# Altium footprint library MISKO.PcbLib: 37 footprints (part 1 of 3)
Each footprint in its own frame and in the unit in brackets; x right, y up, seen from the top. Pads: shape width x height; smd on the part's side, far side on the other; paste and mask are expansions set on the pad; w line width, h text height; cw(c..) or ccw(c..) is an arc to the next point about the centre after c.
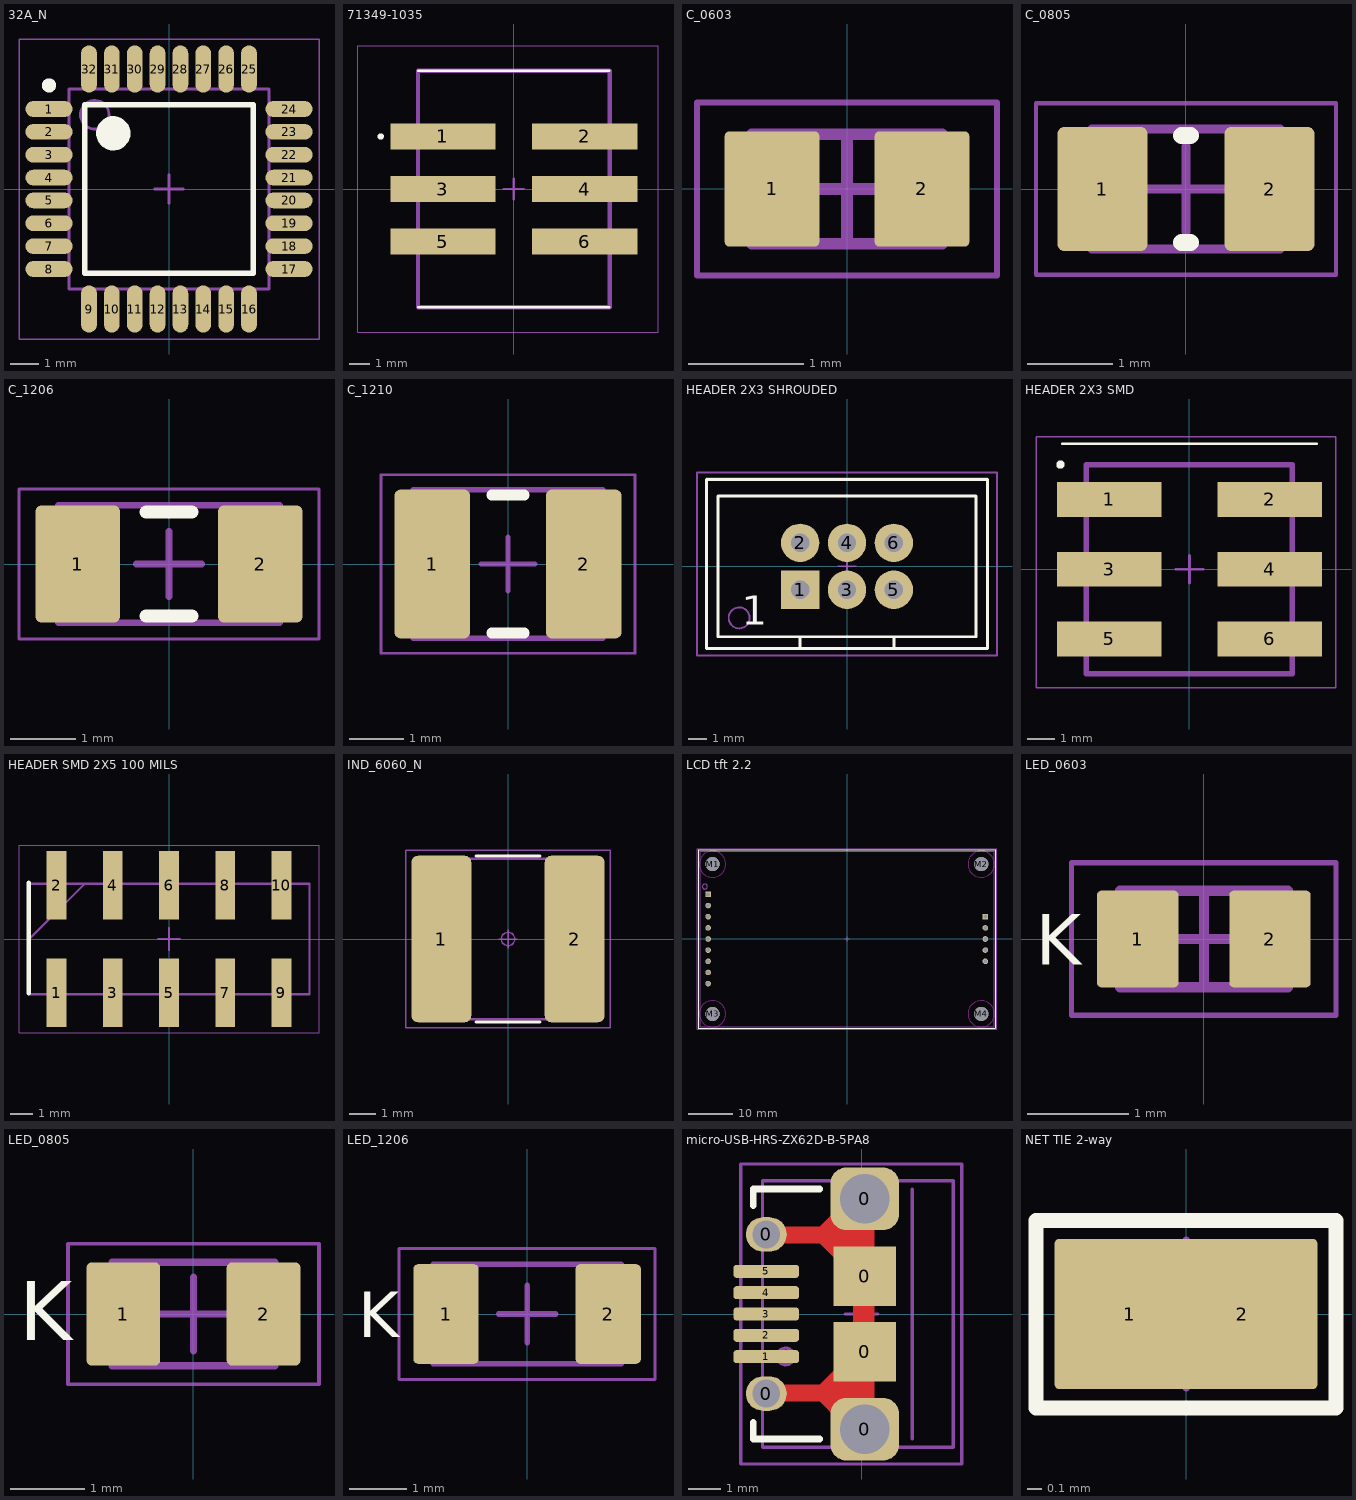
[diagram p0: the footprints below, top view; thin cyan lines are the x and y axes]

## 32A_N [mm]
pads (32):
  oval 1.65x0.55 smd: 1(-4.2,2.8) 2(-4.2,2) 3(-4.2,1.2) 4(-4.2,0.4) 5(-4.2,-0.4) 6(-4.2,-1.2) 7(-4.2,-2) 8(-4.2,-2.8) 17(4.2,-2.8) 18(4.2,-2) 19(4.2,-1.2) 20(4.2,-0.4) 21(4.2,0.4) 22(4.2,1.2) 23(4.2,2) 24(4.2,2.8)
  oval 0.55x1.65 smd: 9(-2.8,-4.2) 10(-2,-4.2) 11(-1.2,-4.2) 12(-0.4,-4.2) 13(0.4,-4.2) 14(1.2,-4.2) 15(2,-4.2) 16(2.8,-4.2) 25(2.8,4.2) 26(2,4.2) 27(1.2,4.2) 28(0.4,4.2) 29(-0.4,4.2) 30(-1.2,4.2) 31(-2,4.2) 32(-2.8,4.2)
Top Overlay:
  circle w0.6: c-1.95,1.95 r0.3
  circle w0.25: c-4.2,3.625 r0.125
  lines w0.2: -2.95,-2.95 2.95,-2.95 2.95,2.95 -2.95,2.95 -2.95,-2.95
Top Component Outline:
  circle w0.1: c-2.6,2.6 r0.5
  lines w0.1: -3.5,-3.5 3.5,-3.5 3.5,3.5 -3.5,3.5 -3.5,-3.5
Top Component courtyard:
  lines w0.05: -5.25,-5.25 5.25,-5.25 5.25,5.25 -5.25,5.25 -5.25,-5.25
  lines w0.1: -0.5,0 0.5,0 ; 0,-0.5 0,0.5
3D body: height 1.2, standoff 0, extent -3.5,-3.5 3.5,3.5

## 71349-1035 [mm] "Molex shrouded 2x3 pin header 100 mils"
pads (6):
  rect 5.08x1.27 smd: 1(-3.43,2.54) 2(3.43,2.54) 3(-3.43,0) 4(3.43,0) 5(-3.43,-2.54) 6(3.43,-2.54)
Top Overlay:
  circle w0.2: c-6.43,2.54 r0.05
  lines w0.1: -4.635,-5.715 4.635,-5.715 ; -4.635,5.715 4.635,5.715
Top Component Outline:
  lines w0.2: -4.635,-5.715 4.635,-5.715 4.635,5.715 -4.635,5.715 -4.635,-5.715
Top Component courtyard:
  lines w0.05: -7.53,-6.915 6.97,-6.915 6.97,6.915 -7.53,6.915 -7.53,-6.915
  lines w0.102: -0.5,0 0.5,0 -0.5,0 ; 0,-0.5 0,0.5 0,-0.5
3D body "71349-1035.stp": height 13.35, standoff 0.01, extent -5.334,-7.366 5.334,7.366

## C_0603 [mm] "Chip Capacitor, 2-Leads, Body 1.57x0.85mm, IPC Medium Density"
height 0.95
pads (2):
  rrect10% 0.82x1 smd: 1(-0.65,0) 2(0.65,0)
Top Component Outline:
  lines w0.1: -0.825,-0.475 0.825,-0.475 0.825,0.475 -0.825,0.475 -0.825,-0.475
Top Component courtyard:
  lines w0.05: -1.3,-0.75 1.3,-0.75 1.3,0.75 -1.3,0.75 -1.3,-0.75
  lines w0.1: -0.475,0 0.475,0 ; 0,-0.475 0,0.475
3D body "C0603N.step": height 0.95, standoff 0, extent -0.825,-0.475 0.825,0.475

## C_0805 [mm] "Chip Capacitor, 2-Leads, Body 2.05x1.25mm, IPC Medium Density"
height 1.4
pads (2):
  rrect15% 1.05x1.45 smd: 1(-0.975,0) 2(0.975,0)
Top Overlay:
  lines w0.2: -0.05,-0.625 0.05,-0.625 ; -0.05,0.625 0.05,0.625
Top Component Outline:
  lines w0.1: -1.1,-0.7 1.1,-0.7 1.1,0.7 -1.1,0.7 -1.1,-0.7
Top Component courtyard:
  lines w0.05: -1.75,-1 1.75,-1 1.75,1 -1.75,1 -1.75,-1
  lines w0.1: -0.5,0 0.5,0 ; 0,-0.5 0,0.5
3D body "C0805_N.step": height 1.4, standoff 0, extent -1.1,-0.7 1.1,0.7

## C_1206 [mm] "Chip Capacitor, 2-Leads, Body 3.20x1.60mm, IPC Medium Density"
height 1.8
pads (2):
  rrect15% 1.3x1.8 smd: 1(-1.4,0) 2(1.4,0)
Top Overlay:
  lines w0.2: -0.35,-0.8 0.35,-0.8 ; -0.35,0.8 0.35,0.8
Top Component Outline:
  lines w0.1: -1.7,-0.9 -1.7,0.9 1.7,0.9 1.7,-0.9 -1.7,-0.9
Top Component courtyard:
  lines w0.05: -2.3,-1.15 -2.3,1.15 2.3,1.15 2.3,-1.15 -2.3,-1.15
  lines w0.1: -0.5,0 0.5,0 ; 0,-0.5 0,0.5
3D body "C1206(3216)_N.step": height 1.8, standoff 0, extent -1.7,-0.9 1.7,0.9

## C_1210 [mm] "Chip Capacitor, 2-Leads, Body 3.20x2.50mm, IPC Medium Density"
height 2.8
pads (2):
  rrect15% 1.4x2.75 smd: 1(-1.4,0) 2(1.4,0)
Top Overlay:
  lines w0.2: -0.3,-1.275 0.3,-1.275 ; -0.3,1.275 0.3,1.275
Top Component Outline:
  lines w0.1: -1.75,-1.375 -1.75,1.375 1.75,1.375 1.75,-1.375 -1.75,-1.375
Top Component courtyard:
  lines w0.05: -2.35,-1.65 -2.35,1.65 2.35,1.65 2.35,-1.65 -2.35,-1.65
  lines w0.1: -0.5,0 0.5,0 ; 0,-0.5 0,0.5
3D body "C1210(3225)_N.step": height 2.8, standoff 0, extent -1.75,-1.375 1.75,1.375

## HEADER 2X3 SHROUDED [mil]
pads (6):
  rect 82x82 hole 39.37: 1(-100,-50)
  round 82 hole 39.37: 2(-100,50) 3(0,-50) 4(0,50) 5(100,-50) 6(100,50)
Top Overlay:
  lines w5.91: -100,-175 -100,-150 ; 100,-175 100,-150 ; -300,-175 -300,185 300,185 300,-175 -300,-175 ; -275,-150 -275,150 275,150 275,-150 -275,-150
  text "1" at -225,-125 h62.5
Top Component Outline:
  circle w4: c-230,-110 r22.36
  lines w4: -300,-175 -300,187.21 300,187.21 300,-175 -300,-175
Top Component courtyard:
  lines w4: -320,-190 320,-190 320,200 -320,200 -320,-190 ; -19.69,0.2 19.68,0.2 -19.69,0.2 ; 0,-19.49 0,19.88 0,-19.49
3D body "0918_SEK_low_profile_male_header_straight_6-pin_2_9_PCB.stp": height 372.05, standoff -125.98, extent -300,-175 300,187.21

## HEADER 2X3 SMD [mil] "SMD 2x3 pin header 100 mils"
pads (6):
  rect 150x50 smd: 1(-115,100) 2(115,100) 3(-115,0) 4(115,0) 5(-115,-100) 6(115,-100)
Top Overlay:
  circle w7.87: c-185,150 r1.97
  lines w3.94: -182.48,180 182.48,180
Top Component Outline:
  lines w7.87: -147.63,-150 -147.63,150 147.64,150 147.64,-150 -147.63,-150
Top Component courtyard:
  lines w1.97: -220,-170 -220,190 210,190 210,-170 -220,-170
  lines w4: -19.69,0 19.68,0 -19.68,0 ; 0,-19.69 0,19.68 0,-19.68
3D body "pin_header_a-sl254-dg-g06mp1.stp": height 384.03, standoff 0.5, extent -147.63,-150 147.64,150

## HEADER SMD 2X5 100 MILS [mm]
pads (10):
  rect 0.9x3.1 smd: 1(-5.08,-2.425) 2(-5.08,2.425) 3(-2.54,-2.425) 4(-2.54,2.425) 5(0,-2.425) 6(0,2.425) 7(2.54,-2.425) 8(2.54,2.425) 9(5.08,-2.425) 10(5.08,2.425)
Top Overlay:
  lines w0.2: -6.33,-2.45 -6.33,2.55
Top Component Outline:
  lines w0.1: -6.35,-0.04 -3.81,2.5 ; -6.35,-2.5 -6.35,2.5 6.35,2.5 6.35,-2.5 -6.35,-2.5
Top Component courtyard:
  lines w0.05: -6.775,-4.225 -6.775,4.225 6.775,4.225 6.775,-4.225 -6.775,-4.225
  lines w0.102: -0.5,0 0.5,0 -0.5,0 ; 0,-0.5 0,0.5 0,-0.5
3D body "M20-8760542P.stp": height 9.85, standoff -0.08, extent -6.33,-3.55 6.37,3.65

## IND_6060_N [mm] "Inductor, Chip; 6.00 mm L X 6.00 mm W X 2.80 mm H body"
height 2.8
pads (2):
  rrect22% 2.24x6.22 smd: 1(-2.49,0) 2(2.49,0)
Top Overlay:
  lines w0.12: -1.19,-3.1 1.19,-3.1 ; -1.19,3.1 1.19,3.1
Top Component Outline:
  lines w0.102: -3,-3 3,-3 ; -3,-3 -3,3 ; -3,-3 -3,3 ; -3,-3 -1.5,-3 -1.5,3 -3,3 ; -3,3 3,3 ; 3,-3 3,3 ; 3,-3 1.5,-3 1.5,3 3,3 ; 3,-3 3,3
Top Component courtyard:
  circle w0.05: c0,0 r0.25
  lines w0.05: -0.35,0 0.35,0 ; 0,-0.35 0,0.35 ; -3.81,-3.31 3.81,-3.31 3.81,3.31 -3.81,3.31 -3.81,-3.31
3D body "STEP-WE-LQS-6045-rev1.stp": height 4.51, standoff 0.01, extent -3,-3 3,3

## LCD tft 2.2 [mm]
pads (18):
  rect 1.27x1.27 hole 0.9: 1(-31.627,10.16) 10(31.5,5.08)
  round 1.27 hole 0.9: 2(-31.627,7.62) 3(-31.627,5.08) 4(-31.627,2.54) 5(-31.627,0) 6(-31.627,-2.54) 7(-31.627,-5.08) 8(-31.627,-7.62) 9(-31.627,-10.16) 11(31.5,2.54) 12(31.5,0) 13(31.5,-2.54) 14(31.5,-5.08)
  round 3.2 hole 3.2 unplated paste+0: M1(-30.627,17.05) M2(30.573,17.05) M3(-30.627,-17.05) M4(30.573,-17.05)
Top Overlay:
  lines w0.1: -33.907,-20.299 33.784,-20.299 33.784,20.341 -33.907,20.341 -33.907,-20.299
Top Solder:
  circle w3: c30.573,17.05 r1.5
  circle w3: c30.573,-17.05 r1.5
  circle w3: c-30.627,-17.05 r1.5
  circle w3: c-30.627,17.05 r1.5
Keep-Out Layer:
  circle w0.102: c30.573,17.05 r3
  circle w0.102: c30.573,-17.05 r3
  circle w0.102: c-30.627,-17.05 r3
  circle w0.102: c-30.627,17.05 r3
Top Component Outline:
  circle w0.102: c-32.357,11.938 r0.568
  lines w0.102: -33.5,-20 33.5,-20 33.5,20 -33.5,20 -33.5,-20
Top Component courtyard:
  lines w0.102: -34.163,-20.574 34.163,-20.574 34.163,20.574 -34.163,20.574 -34.163,-20.574 ; -0.5,0 0.5,0 -0.5,0 ; 0,-0.5 0,0.5 0,-0.5
3D body "User Library-TFT22.STEP": height 17.11, standoff -3.99, extent -33.5,-20 33.5,20

## LED_0603 [mm] "SMD LED, 2-Leads, Body 1.57x0.85mm, IPC Medium Density"
height 0.5
pads (2):
  rrect10% 0.8x0.95 smd: 1(-0.65,0) 2(0.65,0)
Top Overlay:
  text "K" at -1.651,-0.254 h0.5
Top Component Outline:
  lines w0.1: -0.825,-0.475 0.825,-0.475 0.825,0.475 -0.825,0.475 -0.825,-0.475
Top Component courtyard:
  lines w0.05: -1.3,-0.75 1.3,-0.75 1.3,0.75 -1.3,0.75 -1.3,-0.75
  lines w0.1: -0.475,0 0.475,0 ; 0,-0.475 0,0.475
3D body "STEP-WL-SMCW-0603-rev1.stp": height 0.7, standoff 0, extent -0.8,-0.4 0.8,0.4

## LED_0805 [mm] "SMD LED, 2-Leads, Body 2.05x1.25mm, IPC Medium Density"
height 0.8
pads (2):
  rrect15% 1x1.4 smd: 1(-0.95,0) 2(0.95,0)
Top Overlay:
  text "K" at -2.362,-0.356 h0.8
Top Component Outline:
  lines w0.1: -1.1,-0.7 -1.1,0.7 1.1,0.7 1.1,-0.7 -1.1,-0.7
Top Component courtyard:
  lines w0.05: -1.7,-0.95 -1.7,0.95 1.7,0.95 1.7,-0.95 -1.7,-0.95
  lines w0.1: -0.5,0 0.5,0 ; 0,-0.5 0,0.5
3D body "STEP-WL-SMCW-0805-rev1.stp": height 0.7, standoff 0, extent -1,-0.625 1,0.625

## LED_1206 [mm] "SMD LED, 2-Leads, Body 3.15x1.60mm, IPC Medium Density"
height 0.6
pads (2):
  rrect15% 1.15x1.75 smd: 1(-1.425,0) 2(1.425,0)
Top Overlay:
  text "K" at -2.972,-0.406 h0.8
Top Component Outline:
  lines w0.1: -1.65,-0.875 -1.65,0.875 1.65,0.875 1.65,-0.875 -1.65,-0.875
Top Component courtyard:
  lines w0.05: -2.25,-1.15 -2.25,1.15 2.25,1.15 2.25,-1.15 -2.25,-1.15
  lines w0.1: -0.5,0 0.5,0 ; 0,-0.5 0,0.5
3D body "STEP-WL-SMCW-1206-rev1.stp": height 0.68, standoff 0, extent -1.6,-0.8 1.6,0.8

## micro-USB-HRS-ZX62D-B-5PA8 [mm]
pads (11):
  rrect100% 1.25x1.05 hole 0.85: 0(-2.905,-2.425) 0(-2.905,2.425)
  rrect50% 2.1x1.9 hole 1.5: 0(0.095,-3.512) 0(0.095,3.512)
  rect 1.9x1.8 smd: 0(0.095,-1.15) 0(0.095,1.15)
  rrect50% 2x0.4 smd: 1(-2.905,-1.3) 2(-2.905,-0.65) 3(-2.905,0) 4(-2.905,0.65) 5(-2.905,1.3)
Top Layer:
  region: -2.921,-2.159 -1.27,-2.159 -0.254,-1.143 -0.254,1.143 -1.27,2.159 -2.921,2.159 -2.921,2.667 -1.27,2.667 -0.381,3.556 0.381,3.556 0.381,-3.556 -0.381,-3.556 -1.27,-2.667 -2.921,-2.667
Top Overlay:
  lines w0.2: -3.302,-3.302 -3.302,-3.81 -1.27,-3.81 ; -3.302,3.302 -3.302,3.81 -1.27,3.81
Top Solder:
  region: -3.937,1.397 -3.937,-1.397 -1.905,-1.397 -1.905,1.397
Top Component Outline:
  circle w0.102: c-2.318,-1.292 r0.254
  lines w0.1: 1.545,-3.81 1.545,3.81 ; -3.017,-4.064 -3.017,4.064 2.794,4.064 2.794,-4.064 -3.017,-4.064
Top Component courtyard:
  lines w0.102: -0.5,0 0.5,0 ; 0,-0.5 0,0.5 ; -3.683,-4.572 -3.683,4.572 3.048,4.572 3.048,-4.572 -3.683,-4.572
3D body "User Library-MicroUSB-B_Molex_105017-0001.step": height 2.68, standoff -0.62, extent -2.65,-4.1 2.78,4.1

## NET TIE 2-way [mil] "2-way net tie junction"
height 1
pads (2):
  rrect5% 40x40 smd paste-100: 1(-15,0) 2(15,0)
Top Overlay:
  lines w4: -40,-25 40,-25 40,25 -40,25 -40,-25
Top Component courtyard:
  lines w2: -19.69,0 19.68,0 ; 0,-19.69 0,19.68 ; -40,-25 40,-25 40,25 -40,25 -40,-25